# Altium integrated library TLV76133DCYR.IntLib: 1 symbol
Pins are listed as number, name and electrical type; pins without a type are passive.

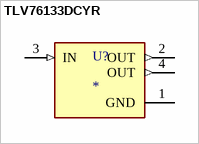
[diagram p0: symbol TLV76133DCYR]

## TLV76133DCYR
designator U?
1-A 16-V high-PSRR linear voltage regulator; MF: Texas Instruments; MP: TLV76133DCYR; SnapEDA_Link: https://www.snapeda.com/parts/TLV76133DCYR/Texas+Instruments/view-part/?ref=snap; Package: SOT-223-4 Texas Instruments; Value: *; Check_prices: https://www.snapeda.com/parts/TLV76133DCYR/Texas+Instruments/view-part/?ref=eda
footprint VREG_TLV76133DCYR
pins: 1 GND (power), 2 OUT (out), 3 IN (in), 4 OUT (out)